# Altium schematic symbol library R_900K.SchLib: 1 symbol
Pins are listed as number, name and electrical type; pins without a type are passive.

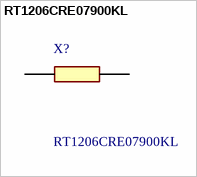
[diagram p0: symbol RT1206CRE07900KL]

## RT1206CRE07900KL
designator X?
900 kOhms +/-0.25% 0.25W, 1/4W Chip Resistor 1206 (3216 Metric) Thin Film; Manufacturer_Name: Yageo Group; Geometry.Height: 0.65mm; Manufacturer_Part_Number: RT1206CRE07900KL; Mouser Part Number: 603-RT1206CRE07900KL; Mouser Price/Stock: https://www.mouser.co.uk/ProductDetail/YAGEO/RT1206CRE07900KL?qs=NgbZBzc1CyHU6TjGHU7Iqg%3D%3D; Arrow Part Number: RT1206CRE07900KL; Arrow Price/Stock: https://www.arrow.com/en/products/rt1206cre07900kl/yageo?region=nac; Datasheet Link: https://www.yageo.com/upload/media/product/productsearch/datasheet/rchip/PYu-RT_1-to-0.01_RoHS_L_15.pdf
footprint RESC3116X65N
pins: 1, 2